# Altium footprint library Switch-DIP.PcbLib: 40 footprints (part 1 of 3)
Each footprint in its own frame and in the unit in brackets; x right, y up, seen from the top. Pads: shape width x height; smd on the part's side, far side on the other; paste and mask are expansions set on the pad; w line width, h text height; cw(c..) or ccw(c..) is an arc to the next point about the centre after c.
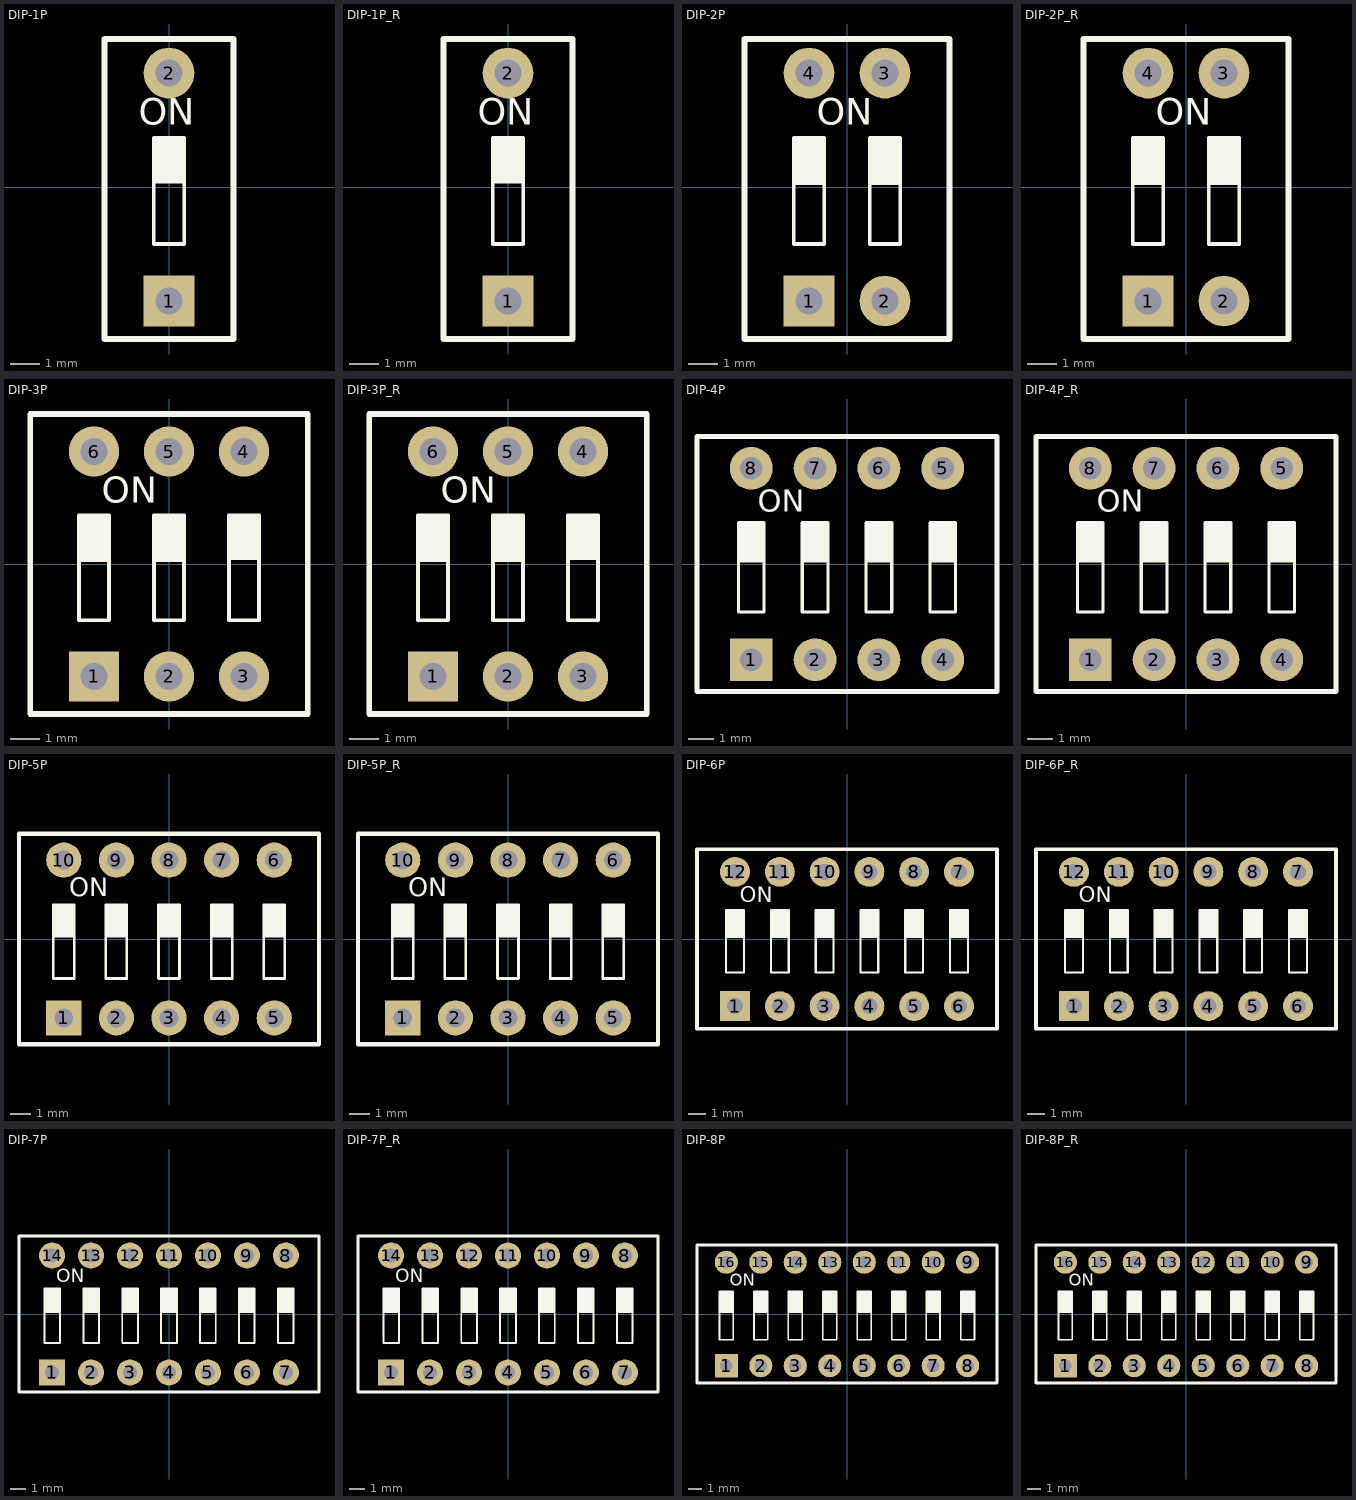
[diagram p0: the footprints below, top view; thin cyan lines are the x and y axes]

## DIP-1P [mm] "4.1*9.9*7mm"
pads (2):
  rect 1.7x1.7 hole 0.9: 1(0,-3.81)
  round 1.7 hole 0.9: 2(0,3.81)
Top Overlay:
  rectangle: -0.508,0.127 0.508,1.651
  lines w0.127: -0.508,-1.905 0.508,-1.905 0.508,1.651 -0.508,1.651 -0.508,-1.905
  lines w0.2: -2.159,-5.08 2.159,-5.08 2.159,4.953 -2.159,4.953 -2.159,-5.08
  text "ON" at -1.016,1.778 h1.52
3D body "DIP-1P.STEP": height 6.65, standoff -3.15, extent -2.068,-4.953 2.032,4.947

## DIP-1P_R [mm] "4.1*9.9*7mm"
pads (2):
  rect 1.7x1.7 hole 0.9: 1(0,-3.81)
  round 1.7 hole 0.9: 2(0,3.81)
Top Overlay:
  rectangle: -0.508,0.127 0.508,1.651
  lines w0.127: -0.508,-1.905 -0.508,1.651 0.508,1.651 0.508,-1.905 -0.508,-1.905
  lines w0.2: -2.159,-5.08 -2.159,4.953 2.159,4.953 2.159,-5.08 -2.159,-5.08
  text "ON" at -1.016,1.778 h1.52
3D body "DIP-1P_R.STEP": height 6.65, standoff -3.15, extent -2.032,-4.953 2.068,4.947

## DIP-2P [mm] "6.6*9.9*7mm"
pads (4):
  rect 1.7x1.7 hole 0.9: 1(-1.27,-3.81)
  round 1.7 hole 0.9: 2(1.27,-3.81) 3(1.27,3.81) 4(-1.27,3.81)
Top Overlay:
  rectangle: 0.762,0.127 1.778,1.651
  rectangle: -1.778,0.127 -0.762,1.651
  lines w0.127: -1.778,0.127 -0.762,0.127 ; 0.762,0.127 1.778,0.127 ; -1.778,-1.905 -0.762,-1.905 -0.762,1.651 -1.778,1.651 -1.778,-1.905 ; 0.762,-1.905 1.778,-1.905 1.778,1.651 0.762,1.651 0.762,-1.905
  lines w0.2: -3.429,-5.08 3.429,-5.08 3.429,4.953 -3.429,4.953 -3.429,-5.08
  text "ON" at -1.016,1.778 h1.52
3D body "DIP-2P.STEP": height 6.65, standoff -3.15, extent -3.302,-4.953 3.338,4.947

## DIP-2P_R [mm] "6.6*9.9*7mm"
pads (4):
  rect 1.7x1.7 hole 0.9: 1(-1.27,-3.81)
  round 1.7 hole 0.9: 2(1.27,-3.81) 3(1.27,3.81) 4(-1.27,3.81)
Top Overlay:
  rectangle: -1.778,0.127 -0.762,1.651
  rectangle: 0.762,0.127 1.778,1.651
  lines w0.127: -1.778,0.127 -0.762,0.127 ; 0.762,0.127 1.778,0.127 ; -1.778,-1.905 -1.778,1.651 -0.762,1.651 -0.762,-1.905 -1.778,-1.905 ; 0.762,-1.905 0.762,1.651 1.778,1.651 1.778,-1.905 0.762,-1.905
  lines w0.2: -3.429,-5.08 -3.429,4.953 3.429,4.953 3.429,-5.08 -3.429,-5.08
  text "ON" at -1.016,1.778 h1.52
3D body "DIP-2P_R.STEP": height 6.65, standoff -3.15, extent -3.32,-4.953 3.32,4.947

## DIP-3P [mm] "9.2*9.9*7mm"
pads (6):
  rect 1.7x1.7 hole 0.9: 1(-2.54,-3.81)
  round 1.7 hole 0.9: 2(0,-3.81) 3(2.54,-3.81) 4(2.54,3.81) 5(0,3.81) 6(-2.54,3.81)
Top Overlay:
  rectangle: 2.032,0.127 3.048,1.651
  rectangle: -3.048,0.127 -2.032,1.651
  rectangle: -0.508,0.127 0.508,1.651
  lines w0.127: -3.048,0.127 -2.032,0.127 ; -0.508,0.127 0.508,0.127 ; -3.048,-1.905 -3.048,1.651 -2.032,1.651 -2.032,-1.905 -3.048,-1.905 ; -0.508,-1.905 -0.508,1.651 0.508,1.651 0.508,-1.905 -0.508,-1.905 ; 2.032,-1.905 3.048,-1.905 3.048,1.651 2.032,1.651 2.032,-1.905
  lines w0.2: -4.699,-5.08 -4.699,5.08 4.699,5.08 4.699,-5.08 -4.699,-5.08
  text "ON" at -2.286,1.778 h1.52
3D body "DIP-3P.STEP": height 6.65, standoff -3.15, extent -4.572,-4.953 4.608,4.947

## DIP-3P_R [mm] "9.2*9.9*7mm"
pads (6):
  rect 1.7x1.7 hole 0.9: 1(-2.54,-3.81)
  round 1.7 hole 0.9: 2(0,-3.81) 3(2.54,-3.81) 4(2.54,3.81) 5(0,3.81) 6(-2.54,3.81)
Top Overlay:
  rectangle: -0.508,0.127 0.508,1.651
  rectangle: -3.048,0.127 -2.032,1.651
  rectangle: 2.032,0.127 3.048,1.651
  lines w0.127: -3.048,0.127 -2.032,0.127 ; -0.508,0.127 0.508,0.127 ; -3.048,-1.905 -2.032,-1.905 -2.032,1.651 -3.048,1.651 -3.048,-1.905 ; -0.508,-1.905 0.508,-1.905 0.508,1.651 -0.508,1.651 -0.508,-1.905 ; 2.032,-1.905 2.032,1.651 3.048,1.651 3.048,-1.905 2.032,-1.905
  lines w0.2: -4.699,-5.08 4.699,-5.08 4.699,5.08 -4.699,5.08 -4.699,-5.08
  text "ON" at -2.286,1.778 h1.52
3D body "DIP-3P_R.STEP": height 6.65, standoff -3.15, extent -4.572,-5.08 4.608,4.82

## DIP-4P [mm] "11.7*9.9*7mm"
pads (8):
  rect 1.7x1.7 hole 0.9: 1(-3.81,-3.81)
  round 1.7 hole 0.9: 2(-1.27,-3.81) 3(1.27,-3.81) 4(3.81,-3.81) 5(3.81,3.81) 6(1.27,3.81) 7(-1.27,3.81) 8(-3.81,3.81)
Top Overlay:
  rectangle: -4.318,0.127 -3.302,1.651
  rectangle: -1.778,0.127 -0.762,1.651
  rectangle: 0.762,0.127 1.778,1.651
  rectangle: 3.302,0.127 4.318,1.651
  lines w0.127: -4.318,0.127 -3.302,0.127 ; -1.778,0.127 -0.762,0.127 ; 0.762,0.127 1.778,0.127 ; 3.302,0.127 4.318,0.127 ; -4.318,-1.905 -4.318,1.651 -3.302,1.651 -3.302,-1.905 -4.318,-1.905 ; -1.778,-1.905 -1.778,1.651 -0.762,1.651 -0.762,-1.905 -1.778,-1.905 ; 0.762,-1.905 0.762,1.651 1.778,1.651 1.778,-1.905 0.762,-1.905 ; 3.302,-1.905 3.302,1.651 4.318,1.651 4.318,-1.905 3.302,-1.905
  lines w0.2: -5.969,-5.08 -5.969,5.08 5.969,5.08 5.969,-5.08 -5.969,-5.08
  text "ON" at -3.556,1.778 h1.52
3D body "DIP-4P.STEP": height 6.65, standoff -3.15, extent -5.842,-4.953 5.878,4.947

## DIP-4P_R [mm] "11.7*9.9*7mm"
pads (8):
  rect 1.7x1.7 hole 0.9: 1(-3.81,-3.81)
  round 1.7 hole 0.9: 2(-1.27,-3.81) 3(1.27,-3.81) 4(3.81,-3.81) 5(3.81,3.81) 6(1.27,3.81) 7(-1.27,3.81) 8(-3.81,3.81)
Top Overlay:
  rectangle: 3.302,0.127 4.318,1.651
  rectangle: 0.762,0.127 1.778,1.651
  rectangle: -1.778,0.127 -0.762,1.651
  rectangle: -4.318,0.127 -3.302,1.651
  lines w0.127: -4.318,0.127 -3.302,0.127 ; -1.778,0.127 -0.762,0.127 ; 0.762,0.127 1.778,0.127 ; 3.302,0.127 4.318,0.127 ; -4.318,-1.905 -3.302,-1.905 -3.302,1.651 -4.318,1.651 -4.318,-1.905 ; -1.778,-1.905 -0.762,-1.905 -0.762,1.651 -1.778,1.651 -1.778,-1.905 ; 0.762,-1.905 1.778,-1.905 1.778,1.651 0.762,1.651 0.762,-1.905 ; 3.302,-1.905 4.318,-1.905 4.318,1.651 3.302,1.651 3.302,-1.905
  lines w0.2: -5.969,-5.08 5.969,-5.08 5.969,5.08 -5.969,5.08 -5.969,-5.08
  text "ON" at -3.556,1.778 h1.52
3D body "DIP-4P_R.STEP": height 6.65, standoff -3.15, extent -5.842,-4.953 5.878,4.947

## DIP-5P [mm] "14.2*9.9*7mm"
pads (10):
  rect 1.7x1.7 hole 0.9: 1(-5.08,-3.81)
  round 1.7 hole 0.9: 2(-2.54,-3.81) 3(0,-3.81) 4(2.54,-3.81) 5(5.08,-3.81) 6(5.08,3.81) 7(2.54,3.81) 8(0,3.81) 9(-2.54,3.81) 10(-5.08,3.81)
Top Overlay:
  rectangle: -5.588,0.127 -4.572,1.651
  rectangle: -3.048,0.127 -2.032,1.651
  rectangle: -0.508,0.127 0.508,1.651
  rectangle: 2.032,0.127 3.048,1.651
  rectangle: 4.572,0.127 5.588,1.651
  lines w0.127: -5.588,0.127 -4.572,0.127 ; -3.048,0.127 -2.032,0.127 ; -0.508,0.127 0.508,0.127 ; 2.032,0.127 3.048,0.127 ; 4.572,0.127 5.588,0.127 ; -5.588,-1.905 -5.588,1.651 -4.572,1.651 -4.572,-1.905 -5.588,-1.905 ; -3.048,-1.905 -3.048,1.651 -2.032,1.651 -2.032,-1.905 -3.048,-1.905 ; -0.508,-1.905 -0.508,1.651 0.508,1.651 0.508,-1.905 -0.508,-1.905 ; 2.032,-1.905 2.032,1.651 3.048,1.651 3.048,-1.905 2.032,-1.905 ; 4.572,-1.905 4.572,1.651 5.588,1.651 5.588,-1.905 4.572,-1.905
  lines w0.2: -7.239,-5.08 -7.239,5.08 7.239,5.08 7.239,-5.08 -7.239,-5.08
  text "ON" at -4.826,1.778 h1.52
3D body "DIP-5P.STEP": height 6.65, standoff -3.15, extent -7.112,-4.953 7.148,4.947

## DIP-5P_R [mm] "14.2*9.9*7mm"
pads (10):
  rect 1.7x1.7 hole 0.9: 1(-5.08,-3.81)
  round 1.7 hole 0.9: 2(-2.54,-3.81) 3(0,-3.81) 4(2.54,-3.81) 5(5.08,-3.81) 6(5.08,3.81) 7(2.54,3.81) 8(0,3.81) 9(-2.54,3.81) 10(-5.08,3.81)
Top Overlay:
  rectangle: 4.572,0.127 5.588,1.651
  rectangle: 2.032,0.127 3.048,1.651
  rectangle: -0.508,0.127 0.508,1.651
  rectangle: -3.048,0.127 -2.032,1.651
  rectangle: -5.588,0.127 -4.572,1.651
  lines w0.127: -5.588,0.127 -4.572,0.127 ; -3.048,0.127 -2.032,0.127 ; -0.508,0.127 0.508,0.127 ; 2.032,0.127 3.048,0.127 ; 4.572,0.127 5.588,0.127 ; -5.588,-1.905 -4.572,-1.905 -4.572,1.651 -5.588,1.651 -5.588,-1.905 ; -3.048,-1.905 -2.032,-1.905 -2.032,1.651 -3.048,1.651 -3.048,-1.905 ; -0.508,-1.905 0.508,-1.905 0.508,1.651 -0.508,1.651 -0.508,-1.905 ; 2.032,-1.905 3.048,-1.905 3.048,1.651 2.032,1.651 2.032,-1.905 ; 4.572,-1.905 5.588,-1.905 5.588,1.651 4.572,1.651 4.572,-1.905
  lines w0.2: -7.239,-5.08 7.239,-5.08 7.239,5.08 -7.239,5.08 -7.239,-5.08
  text "ON" at -4.826,1.778 h1.52
3D body "DIP-5P_R.STEP": height 6.65, standoff -3.15, extent -7.112,-4.953 7.148,4.947

## DIP-6P [mm] "16.8*9.9*7mm"
pads (12):
  rect 1.7x1.7 hole 0.9: 1(-6.35,-3.81)
  round 1.7 hole 0.9: 2(-3.81,-3.81) 3(-1.27,-3.81) 4(1.27,-3.81) 5(3.81,-3.81) 6(6.35,-3.81) 7(6.35,3.81) 8(3.81,3.81) 9(1.27,3.81) 10(-1.27,3.81) 11(-3.81,3.81) 12(-6.35,3.81)
Top Overlay:
  rectangle: 5.842,0.127 6.858,1.651
  rectangle: 3.302,0.127 4.318,1.651
  rectangle: 0.762,0.127 1.778,1.651
  rectangle: -1.778,0.127 -0.762,1.651
  rectangle: -4.318,0.127 -3.302,1.651
  rectangle: -6.858,0.127 -5.842,1.651
  lines w0.127: -6.858,0.127 -5.842,0.127 ; -4.318,0.127 -3.302,0.127 ; -1.778,0.127 -0.762,0.127 ; 0.762,0.127 1.778,0.127 ; 3.302,0.127 4.318,0.127 ; 5.842,0.127 6.858,0.127 ; -6.858,-1.905 -5.842,-1.905 -5.842,1.651 -6.858,1.651 -6.858,-1.905 ; -4.318,-1.905 -3.302,-1.905 -3.302,1.651 -4.318,1.651 -4.318,-1.905 ; -1.778,-1.905 -0.762,-1.905 -0.762,1.651 -1.778,1.651 -1.778,-1.905 ; 0.762,-1.905 1.778,-1.905 1.778,1.651 0.762,1.651 0.762,-1.905 ; 3.302,-1.905 4.318,-1.905 4.318,1.651 3.302,1.651 3.302,-1.905 ; 5.842,-1.905 6.858,-1.905 6.858,1.651 5.842,1.651 5.842,-1.905
  lines w0.2: -8.509,-5.08 8.509,-5.08 8.509,5.08 -8.509,5.08 -8.509,-5.08
  text "ON" at -6.096,1.778 h1.52
3D body "DIP-6P.STEP": height 6.65, standoff -3.15, extent -8.4,-4.947 8.4,4.953

## DIP-6P_R [mm] "16.8*9.9*7mm"
pads (12):
  rect 1.7x1.7 hole 0.9: 1(-6.35,-3.81)
  round 1.7 hole 0.9: 2(-3.81,-3.81) 3(-1.27,-3.81) 4(1.27,-3.81) 5(3.81,-3.81) 6(6.35,-3.81) 7(6.35,3.81) 8(3.81,3.81) 9(1.27,3.81) 10(-1.27,3.81) 11(-3.81,3.81) 12(-6.35,3.81)
Top Overlay:
  rectangle: 5.842,0.127 6.858,1.651
  rectangle: 3.302,0.127 4.318,1.651
  rectangle: 0.762,0.127 1.778,1.651
  rectangle: -1.778,0.127 -0.762,1.651
  rectangle: -4.318,0.127 -3.302,1.651
  rectangle: -6.858,0.127 -5.842,1.651
  lines w0.127: -6.858,0.127 -5.842,0.127 ; -4.318,0.127 -3.302,0.127 ; -1.778,0.127 -0.762,0.127 ; 0.762,0.127 1.778,0.127 ; 3.302,0.127 4.318,0.127 ; 5.842,0.127 6.858,0.127 ; -6.858,-1.905 -5.842,-1.905 -5.842,1.651 -6.858,1.651 -6.858,-1.905 ; -4.318,-1.905 -3.302,-1.905 -3.302,1.651 -4.318,1.651 -4.318,-1.905 ; -1.778,-1.905 -0.762,-1.905 -0.762,1.651 -1.778,1.651 -1.778,-1.905 ; 0.762,-1.905 1.778,-1.905 1.778,1.651 0.762,1.651 0.762,-1.905 ; 3.302,-1.905 4.318,-1.905 4.318,1.651 3.302,1.651 3.302,-1.905 ; 5.842,-1.905 6.858,-1.905 6.858,1.651 5.842,1.651 5.842,-1.905
  lines w0.2: -8.509,-5.08 8.509,-5.08 8.509,5.08 -8.509,5.08 -8.509,-5.08
  text "ON" at -6.096,1.778 h1.52
3D body "DIP-6P_R.STEP": height 6.65, standoff -3.15, extent -8.382,-4.953 8.418,4.947

## DIP-7P [mm] "19.3*9.9*7mm"
pads (14):
  rect 1.7x1.7 hole 0.9: 1(-7.62,-3.81)
  round 1.7 hole 0.9: 2(-5.08,-3.81) 3(-2.54,-3.81) 4(0,-3.81) 5(2.54,-3.81) 6(5.08,-3.81) 7(7.62,-3.81) 8(7.62,3.81) 9(5.08,3.81) 10(2.54,3.81) 11(0,3.81) 12(-2.54,3.81) 13(-5.08,3.81) 14(-7.62,3.81)
Top Overlay:
  rectangle: 7.112,0.127 8.128,1.651
  rectangle: -8.128,0.127 -7.112,1.651
  rectangle: -5.588,0.127 -4.572,1.651
  rectangle: -3.048,0.127 -2.032,1.651
  rectangle: -0.508,0.127 0.508,1.651
  rectangle: 2.032,0.127 3.048,1.651
  rectangle: 4.572,0.127 5.588,1.651
  lines w0.127: -8.128,0.127 -7.112,0.127 ; -5.588,0.127 -4.572,0.127 ; -3.048,0.127 -2.032,0.127 ; -0.508,0.127 0.508,0.127 ; 2.032,0.127 3.048,0.127 ; 4.572,0.127 5.588,0.127 ; 7.112,0.127 8.128,0.127 ; -8.128,-1.905 -8.128,1.651 -7.112,1.651 -7.112,-1.905 -8.128,-1.905 ; -5.588,-1.905 -5.588,1.651 -4.572,1.651 -4.572,-1.905 -5.588,-1.905 ; -3.048,-1.905 -3.048,1.651 -2.032,1.651 -2.032,-1.905 -3.048,-1.905 ; -0.508,-1.905 -0.508,1.651 0.508,1.651 0.508,-1.905 -0.508,-1.905 ; 2.032,-1.905 2.032,1.651 3.048,1.651 3.048,-1.905 2.032,-1.905 ; 4.572,-1.905 4.572,1.651 5.588,1.651 5.588,-1.905 4.572,-1.905 ; 7.112,-1.905 8.128,-1.905 8.128,1.651 7.112,1.651 7.112,-1.905
  lines w0.2: -9.779,-5.08 -9.779,5.08 9.779,5.08 9.779,-5.08 -9.779,-5.08
  text "ON" at -7.366,1.778 h1.52
3D body "DIP-7P.STEP": height 6.65, standoff -3.15, extent -9.652,-4.95 9.688,4.95

## DIP-7P_R [mm] "19.3*9.9*7mm"
pads (14):
  rect 1.7x1.7 hole 0.9: 1(-7.62,-3.81)
  round 1.7 hole 0.9: 2(-5.08,-3.81) 3(-2.54,-3.81) 4(0,-3.81) 5(2.54,-3.81) 6(5.08,-3.81) 7(7.62,-3.81) 8(7.62,3.81) 9(5.08,3.81) 10(2.54,3.81) 11(0,3.81) 12(-2.54,3.81) 13(-5.08,3.81) 14(-7.62,3.81)
Top Overlay:
  rectangle: 4.572,0.127 5.588,1.651
  rectangle: 2.032,0.127 3.048,1.651
  rectangle: -0.508,0.127 0.508,1.651
  rectangle: -3.048,0.127 -2.032,1.651
  rectangle: -5.588,0.127 -4.572,1.651
  rectangle: -8.128,0.127 -7.112,1.651
  rectangle: 7.112,0.127 8.128,1.651
  lines w0.127: -8.128,0.127 -7.112,0.127 ; -5.588,0.127 -4.572,0.127 ; -3.048,0.127 -2.032,0.127 ; -0.508,0.127 0.508,0.127 ; 2.032,0.127 3.048,0.127 ; 4.572,0.127 5.588,0.127 ; 7.112,0.127 8.128,0.127 ; -8.128,-1.905 -7.112,-1.905 -7.112,1.651 -8.128,1.651 -8.128,-1.905 ; -5.588,-1.905 -4.572,-1.905 -4.572,1.651 -5.588,1.651 -5.588,-1.905 ; -3.048,-1.905 -2.032,-1.905 -2.032,1.651 -3.048,1.651 -3.048,-1.905 ; -0.508,-1.905 0.508,-1.905 0.508,1.651 -0.508,1.651 -0.508,-1.905 ; 2.032,-1.905 3.048,-1.905 3.048,1.651 2.032,1.651 2.032,-1.905 ; 4.572,-1.905 5.588,-1.905 5.588,1.651 4.572,1.651 4.572,-1.905 ; 7.112,-1.905 7.112,1.651 8.128,1.651 8.128,-1.905 7.112,-1.905
  lines w0.2: -9.779,-5.08 9.779,-5.08 9.779,5.08 -9.779,5.08 -9.779,-5.08
  text "ON" at -7.366,1.778 h1.52
3D body "DIP-7P_R.STEP": height 6.65, standoff -3.15, extent -9.652,-4.95 9.688,4.95

## DIP-8P [mm] "21.9*9.9*7mm"
pads (16):
  rect 1.7x1.7 hole 0.9: 1(-8.89,-3.81)
  round 1.7 hole 0.9: 2(-6.35,-3.81) 3(-3.81,-3.81) 4(-1.27,-3.81) 5(1.27,-3.81) 6(3.81,-3.81) 7(6.35,-3.81) 8(8.89,-3.81) 9(8.89,3.81) 10(6.35,3.81) 11(3.81,3.81) 12(1.27,3.81) 13(-1.27,3.81) 14(-3.81,3.81) 15(-6.35,3.81) 16(-8.89,3.81)
Top Overlay:
  rectangle: 8.382,0.127 9.398,1.651
  rectangle: 3.302,0.127 4.318,1.651
  rectangle: 0.762,0.127 1.778,1.651
  rectangle: -1.778,0.127 -0.762,1.651
  rectangle: -4.318,0.127 -3.302,1.651
  rectangle: -6.858,0.127 -5.842,1.651
  rectangle: -9.398,0.127 -8.382,1.651
  rectangle: 5.842,0.127 6.858,1.651
  lines w0.127: -9.398,0.127 -8.382,0.127 ; -6.858,0.127 -5.842,0.127 ; -4.318,0.127 -3.302,0.127 ; -1.778,0.127 -0.762,0.127 ; 0.762,0.127 1.778,0.127 ; 3.302,0.127 4.318,0.127 ; 5.842,0.127 6.858,0.127 ; 8.382,0.127 9.398,0.127 ; -9.398,-1.905 -8.382,-1.905 -8.382,1.651 -9.398,1.651 -9.398,-1.905 ; -6.858,-1.905 -5.842,-1.905 -5.842,1.651 -6.858,1.651 -6.858,-1.905 ; -4.318,-1.905 -3.302,-1.905 -3.302,1.651 -4.318,1.651 -4.318,-1.905 ; -1.778,-1.905 -0.762,-1.905 -0.762,1.651 -1.778,1.651 -1.778,-1.905 ; 0.762,-1.905 1.778,-1.905 1.778,1.651 0.762,1.651 0.762,-1.905 ; 3.302,-1.905 4.318,-1.905 4.318,1.651 3.302,1.651 3.302,-1.905 ; 5.842,-1.905 5.842,1.651 6.858,1.651 6.858,-1.905 5.842,-1.905 ; 8.382,-1.905 9.398,-1.905 9.398,1.651 8.382,1.651 8.382,-1.905
  lines w0.2: -11.049,-5.08 11.049,-5.08 11.049,5.08 -11.049,5.08 -11.049,-5.08
  text "ON" at -8.636,1.778 h1.52
3D body "DIP-8P.STEP": height 6.65, standoff -3.15, extent -10.922,-4.95 10.958,4.95

## DIP-8P_R [mm] "21.9*9.9*7mm"
pads (16):
  rect 1.7x1.7 hole 0.9: 1(-8.89,-3.81)
  round 1.7 hole 0.9: 2(-6.35,-3.81) 3(-3.81,-3.81) 4(-1.27,-3.81) 5(1.27,-3.81) 6(3.81,-3.81) 7(6.35,-3.81) 8(8.89,-3.81) 9(8.89,3.81) 10(6.35,3.81) 11(3.81,3.81) 12(1.27,3.81) 13(-1.27,3.81) 14(-3.81,3.81) 15(-6.35,3.81) 16(-8.89,3.81)
Top Overlay:
  rectangle: 8.382,0.127 9.398,1.651
  rectangle: 3.302,0.127 4.318,1.651
  rectangle: 0.762,0.127 1.778,1.651
  rectangle: -1.778,0.127 -0.762,1.651
  rectangle: -4.318,0.127 -3.302,1.651
  rectangle: -6.858,0.127 -5.842,1.651
  rectangle: -9.398,0.127 -8.382,1.651
  rectangle: 5.842,0.127 6.858,1.651
  lines w0.127: -9.398,0.127 -8.382,0.127 ; -6.858,0.127 -5.842,0.127 ; -4.318,0.127 -3.302,0.127 ; -1.778,0.127 -0.762,0.127 ; 0.762,0.127 1.778,0.127 ; 3.302,0.127 4.318,0.127 ; 5.842,0.127 6.858,0.127 ; 8.382,0.127 9.398,0.127 ; -9.398,-1.905 -8.382,-1.905 -8.382,1.651 -9.398,1.651 -9.398,-1.905 ; -6.858,-1.905 -5.842,-1.905 -5.842,1.651 -6.858,1.651 -6.858,-1.905 ; -4.318,-1.905 -3.302,-1.905 -3.302,1.651 -4.318,1.651 -4.318,-1.905 ; -1.778,-1.905 -0.762,-1.905 -0.762,1.651 -1.778,1.651 -1.778,-1.905 ; 0.762,-1.905 1.778,-1.905 1.778,1.651 0.762,1.651 0.762,-1.905 ; 3.302,-1.905 4.318,-1.905 4.318,1.651 3.302,1.651 3.302,-1.905 ; 5.842,-1.905 5.842,1.651 6.858,1.651 6.858,-1.905 5.842,-1.905 ; 8.382,-1.905 9.398,-1.905 9.398,1.651 8.382,1.651 8.382,-1.905
  lines w0.2: -11.049,-5.08 11.049,-5.08 11.049,5.08 -11.049,5.08 -11.049,-5.08
  text "ON" at -8.636,1.778 h1.52
3D body "DIP-8P_R.STEP": height 6.65, standoff -3.15, extent -10.922,-4.95 10.958,4.95